# Altium footprint library J0011D21BNL.PcbLib: 1 footprints
Each footprint in its own frame and in the unit in brackets; x right, y up, seen from the top. Pads: shape width x height; smd on the part's side, far side on the other; paste and mask are expansions set on the pad; w line width, h text height; cw(c..) or ccw(c..) is an arc to the next point about the centre after c.
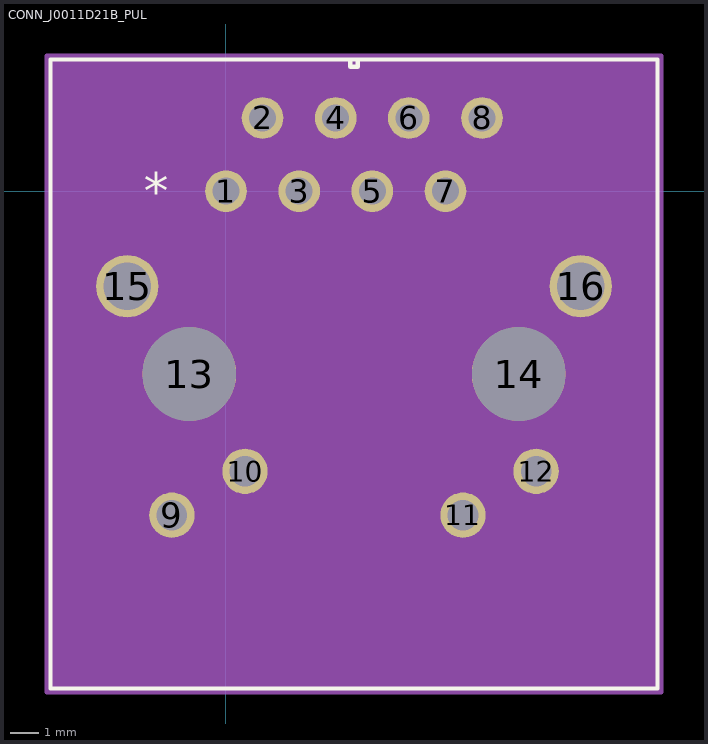
[diagram p0: the footprint, top view; thin cyan lines are the x and y axes]

## CONN_J0011D21B_PUL [mil]
pads (16):
  round 57 hole 37 paste-28.5 mask+0: 1(0,0) 2(50,100) 3(100,0) 4(150,100) 5(200,0) 6(250,100) 7(300,0) 8(350,100)
  round 62 hole 42 paste-31 mask+0: 9(-74,-443) 10(26,-383) 11(324,-443) 12(424,-383)
  round 128 hole 128 unplated paste+0 mask+0: 13(-50,-250) 14(400,-250)
  round 85 hole 65 unplated: 15(-135,-130) 16(485,-130)
Top Overlay:
  lines w6: -240,-680 590,-680 590,180 -240,180 -240,-680 ; 170,170 180,170 180,180 170,180 170,170
  text "*" at -112.5,-25 h50
  text ".Designator" at 37.5,-25 h50
Bottom Overlay:
  text "*" at -112.5,-25 h50
Mechanical 13:
  lines w1: 175,175 175,175 ; 175,175 175,175 ; 175,175 175,175 ; 175,175 175,175 ; -235,-675 585,-675 585,175 -235,175 -235,-675
  text ".Designator" at 37.5,-25 h50
  text "*" at -112.5,-25 h50
Mechanical 15:
  region: 595,-685 595,185 -245,185 -245,-685
  lines w6: -245,-685 -245,185 595,185 595,-685 -245,-685